# EAGLE library part TPS22919DCKR (library astra)
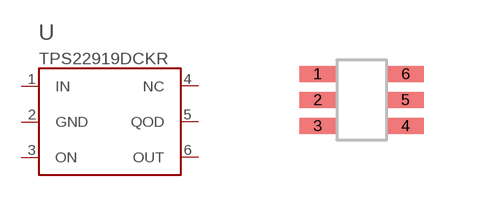
[diagram p15: symbol with the pads of TI_DCK6_SENSE; footprint TI_DCK6_SENSE]

Designator prefix U

## TPS22919DCKR  [TI_DCK6_SENSE]
1  IN  pwr
2  GND  pwr
3  ON  in
4  NC  nc
5  QOD  pas
6  OUT  out

## Footprint TI_DCK6_SENSE (pad centres in mm)
TI TPS22919 DCK0006A PCB layout.
smd 0.9 x 0.4: 1 -1.1,0.65; 2 -1.1,0; 3 -1.1,-0.65; 4 1.1,-0.65; 5 1.1,0; 6 1.1,0.65